# EAGLE library part TPS22918 (library orb)
TI TPS22918DBVR load switch (SOT-23-6)
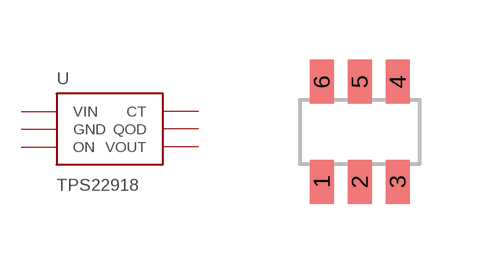
[diagram p6: symbol with the pads of SOT23_6; footprint SOT23_6]

Designator prefix U

## TPS22918  [SOT23_6]
1  VIN  pas
2  GND  pas
3  ON  pas
4  CT  pas
5  QOD  pas
6  VOUT  pas

## Footprint SOT23_6 (pad centres in mm)
SOT-23-6, 0.95 mm pitch (JEDEC MO-178), generic land pattern
smd 0.6 x 1.1: 1 -0.95,-1.25; 2 0,-1.25; 3 0.95,-1.25; 4 0.95,1.25; 5 0,1.25; 6 -0.95,1.25